# Altium footprint library KY-383-PM-DB27408.PcbLib: 2 footprints
Each footprint in its own frame and in the unit in brackets; x right, y up, seen from the top. Pads: shape width x height; smd on the part's side, far side on the other; paste and mask are expansions set on the pad; w line width, h text height; cw(c..) or ccw(c..) is an arc to the next point about the centre after c.
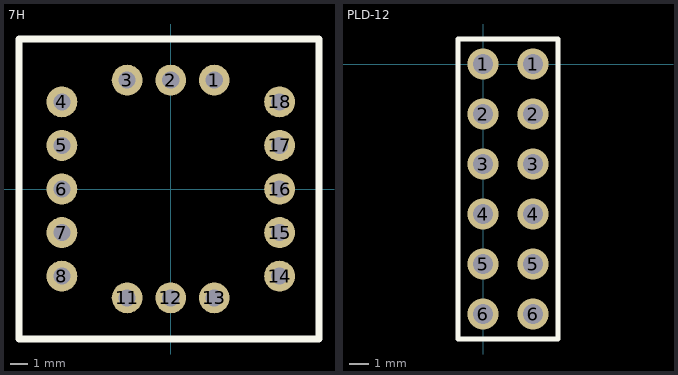
[diagram p0: the footprints below, top view; thin cyan lines are the x and y axes]

## 7H [mm]
pads (16):
  round 1.8 hole 1 mask+0.15: 1(2.54,6.35) 2(0,6.35) 3(-2.54,6.35) 4(-6.35,5.08) 5(-6.35,2.54) 6(-6.35,0) 7(-6.35,-2.54) 8(-6.35,-5.08) 11(-2.54,-6.35) 12(0,-6.35) 13(2.54,-6.35) 14(6.35,-5.08) 15(6.35,-2.54) 16(6.35,0) 17(6.35,2.54) 18(6.35,5.08)
Top Overlay:
  lines w0.4: -8.85,-8.75 -8.85,8.75 8.65,8.75 8.65,-8.75 -8.85,-8.75

## PLD-12 [mm] "KUPPLS"
pads (12):
  round 1.6 hole 1: 1(0,0) 1(2.54,0) 2(0,-2.54) 2(2.54,-2.54) 3(0,-5.08) 3(2.54,-5.08) 4(0,-7.62) 4(2.54,-7.62) 5(0,-10.16) 5(2.54,-10.16) 6(0,-12.7) 6(2.54,-12.7)
Top Overlay:
  lines w0.254: -1.27,-13.97 -1.27,1.27 3.81,1.27 3.81,-13.97 -1.27,-13.97
3D body "PLD-12.step": height 8.4, standoff -3, extent -1.23,-13.97 3.77,1.27